# Altium schematic symbol library NTF6P02T3G.SchLib: 1 symbol
Pins are listed as number, name and electrical type; pins without a type are passive.

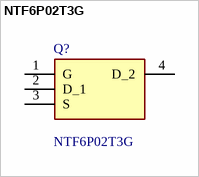
[diagram p0: symbol NTF6P02T3G]

## NTF6P02T3G
designator Q?
Diode Exhibits High Speed, Soft Recovery; Avalanche Energy Specified; Pb-Free Package is Available; Logic Level Gate Drive; Low RDS(on); Manufacturer_Name: onsemi; Geometry.Height: 1.75mm; Mouser Part Number: 863-NTF6P02T3G; Mouser Price/Stock: https://www.mouser.co.uk/ProductDetail/onsemi/NTF6P02T3G?qs=ZXBb0xZ9WeDFlv0DxlzZdg%3D%3D; Manufacturer_Part_Number: NTF6P02T3G; Datasheet Link: https://www.onsemi.com/pub/Collateral/NTF6P02T3-D.PDF
footprint SOT230P700X175-4N
pins: 1 G, 2 D_1, 3 S, 4 D_2